# Altium schematic symbol library Clema_Diode.SchLib: 8 symbols
Pins are listed as number, name and electrical type; pins without a type are passive.

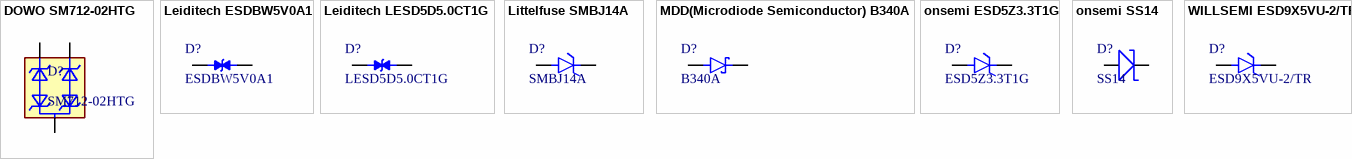
[diagram p0: symbols DOWO SM712-02HTG to WILLSEMI ESD9X5VU-2/TR]

## DOWO SM712-02HTG
designator D?, comment SM712-02HTG
ESD DIODE 12VWM 7VWM 26VC 10VC SOT-23; Manufacturer: DOWO; Type: SMD; Manufacturer Part Number: SM712-02HTG; LCSC Part Number: C5449363; Mouser Part Number: 576-SM712-02HTG; Package: SOT-23
footprint SM712-02HTG_SOT23
pins: 1, 2, 3

## Leiditech ESDBW5V0A1
designator D?, comment ESDBW5V0A1
ESD DIODE 5VWM 12VC DFN1006-2; Manufacturer: Leiditech; Type: SMD; Manufacturer Part Number: ESDBW5V0A1; LCSC Part Number: C5173252; Mouser Part Number: 504-STN061050B351; Package: DFN1006-2
footprint ESDBW5V0A1_DFN1006-2
pins: 1, 2

## Leiditech LESD5D5.0CT1G
designator D?, comment LESD5D5.0CT1G
ESD DIODE 5VWM 12VC SOD-523; Manufacturer: Leiditech; Type: SMD; Manufacturer Part Number: LESD5D5.0CT1G; DigiKey Part Number: 6557-LESD5D5.0CT1GTR-ND; LCSC Part Number: C5246195; Package: SOD-523
footprint LESD5D5.0CT1G_SOD-523
pins: 1, 2

## Littelfuse SMBJ14A
designator D?, comment SMBJ14A
TVS DIODE 14VWM 23.2VC DO-214AA; Manufacturer: Littelfuse; Type: SMD; Manufacturer Part Number: SMBJ14A; DigiKey Part Number: SMBJ14ABTR-ND; LCSC Part Number: C315990; Mouser Part Number: 504-SMBJE14A; Package: DO-214AA
footprint SMBJ14A_DO-214AA
pins: 1, 2

## MDD(Microdiode Semiconductor) B340A
designator D?, comment B340A
DIODE SCHOTTKY 40V SMA(DO-214AC); Manufacturer: MDD(Microdiode Semiconductor); Type: SMD; Manufacturer Part Number: B340A; LCSC Part Number: C64982; Mouser Part Number: 625-BD340A-E3/61T; Package: SMA(DO-214AC)
footprint B340A_SMA(DO-214AC)
pins: A, C

## onsemi ESD5Z3.3T1G
designator D?, comment ESD5Z3.3T1G
TVS DIODE 3.3VWM 14.1VC SOD-523; Manufacturer: onsemi; Type: SMD; Manufacturer Part Number: ESD5Z3.3T1G; DigiKey Part Number: ESD5Z3.3T1GOSTR-ND; LCSC Part Number: C61148; Mouser Part Number: 863-ESD5Z3.3T1G; Package: FBP-02C
footprint ESD5Z3.3T1G_SOD-523
pins: 1, 2

## onsemi SS14
designator D?, comment SS14
DIODE SCHOTTKY 40V SMA(DO-214AC); Manufacturer: onsemi; Type: SMD; Manufacturer Part Number: SS14; DigiKey Part Number: SS14TR-ND; LCSC Part Number: C83852; Mouser Part Number: 512-SS14; Package: SMA(DO-214AC)
footprint SS14_SMA(DO-214AC)
pins: 1, 2

## WILLSEMI ESD9X5VU-2/TR
designator D?, comment ESD9X5VU-2/TR
TVS DIODE 5VWM 18VC 15VC FBP-02C; Manufacturer: WILLSEMI; Type: SMD; Manufacturer Part Number: ESD9X5VU-2/TR; LCSC Part Number: C189964; Package: FBP-02C
footprint ESD9X5VU-2/TR_FBP-02C
pins: 1, 2